# Altium footprint library Fuse.PcbLib: 15 footprints
Each footprint in its own frame and in the unit in brackets; x right, y up, seen from the top. Pads: shape width x height; smd on the part's side, far side on the other; paste and mask are expansions set on the pad; w line width, h text height; cw(c..) or ccw(c..) is an arc to the next point about the centre after c.
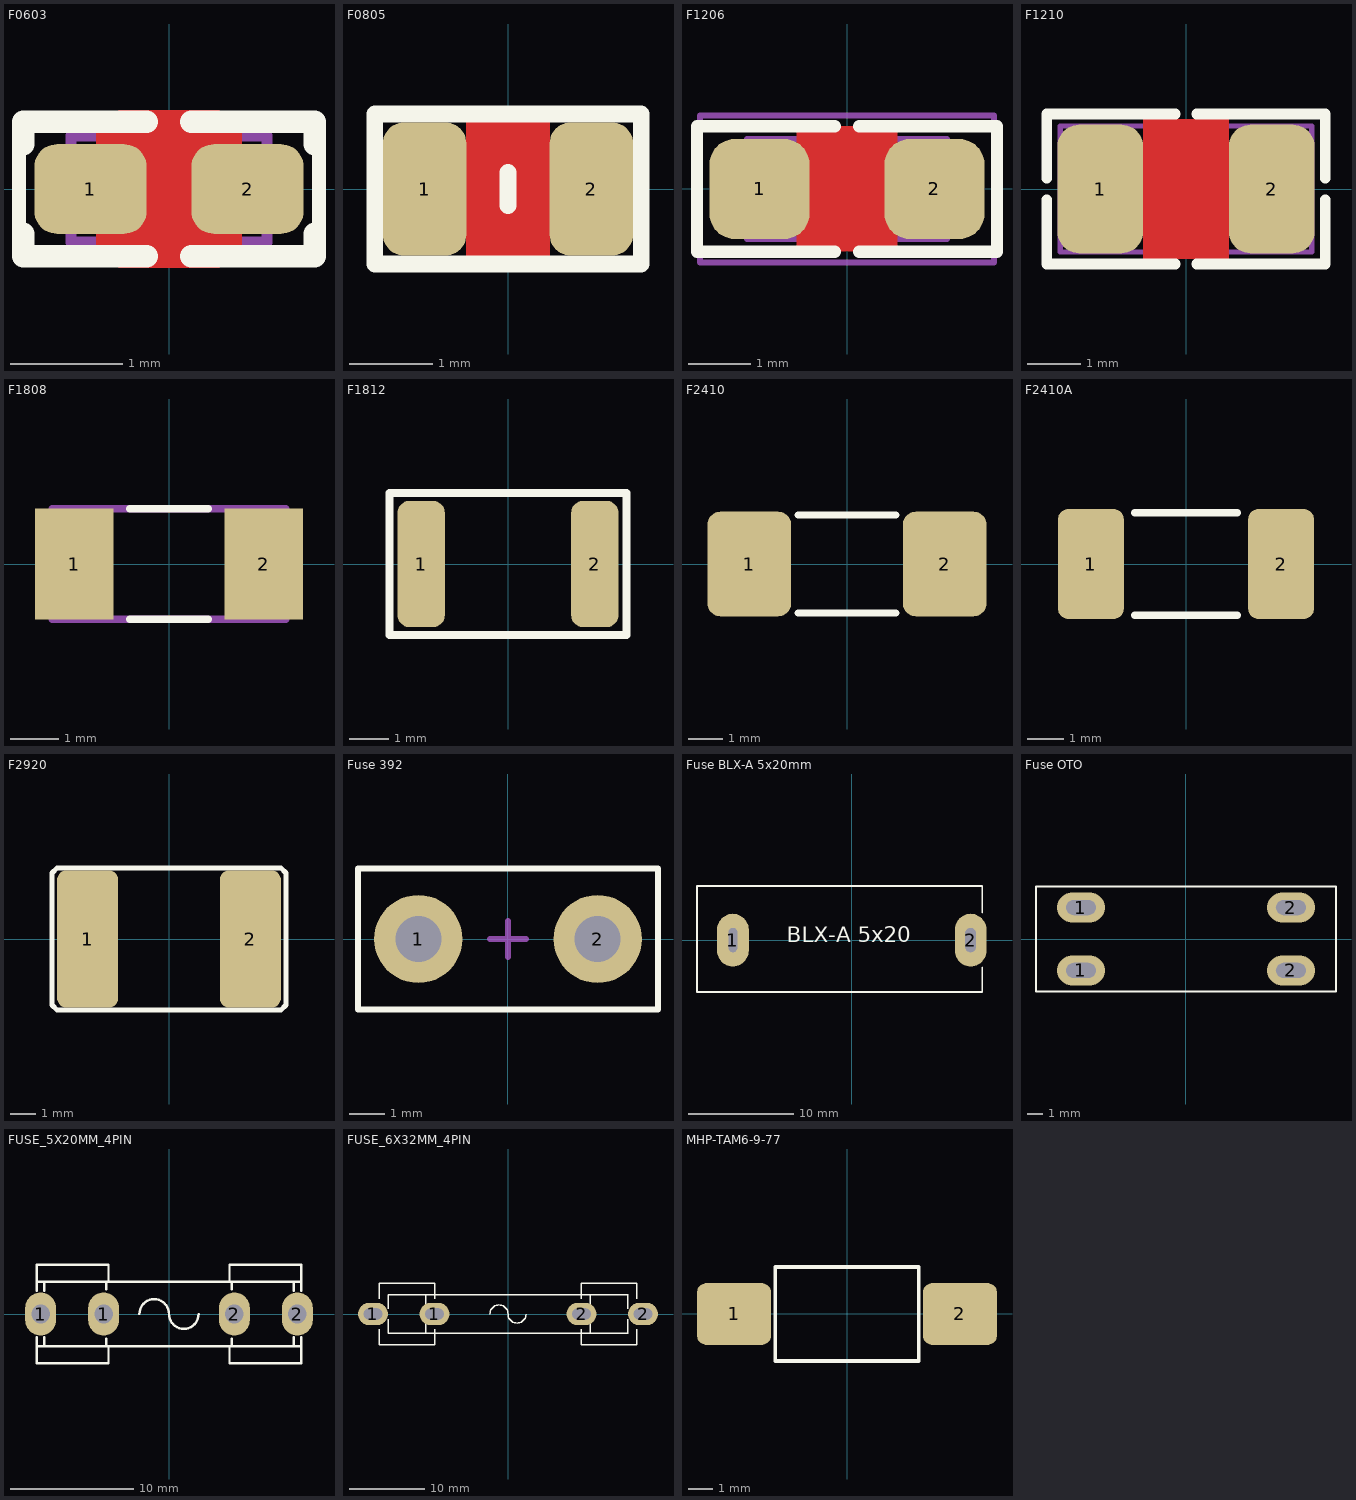
[diagram p0: the footprints below, top view; thin cyan lines are the x and y axes]

## F0603 [mm] "FUSE FAST 500mA, 1.6x0.8mm, 0603"
height 0.8
pads (2):
  rrect50% 1x0.8 smd paste-2 mask+0.075: 1(-0.7,0) 2(0.7,0)
Top Layer:
  pour cut-out: -0.65,0.5 -0.45,0.7 0.45,0.7 0.65,0.5 0.65,-0.5 0.45,-0.7 -0.45,-0.7 -0.65,-0.5
Top Overlay:
  lines w0.125: -1.337,-0.4 -1.337,0.4 ; 1.337,-0.4 1.337,0.4
  lines w0.2: -1.3,-0.4 -1.3,-0.6 -0.2,-0.6 ; -1.3,0.4 -1.3,0.6 -0.2,0.6 ; 0.2,-0.6 1.3,-0.6 1.3,-0.4 ; 0.2,0.6 1.3,0.6 1.3,0.4
Top Paste:
  region: 0.7,0.35 0.63,0.35 0.502,0.297 0.403,0.198 0.35,0.07 0.35,0 0.35,-0.07 0.403,-0.198 0.502,-0.297 0.63,-0.35 0.7,-0.35 0.9,-0.35 0.93,-0.35 0.985,-0.327 1.027,-0.285 1.05,-0.23 1.05,-0.2 1.05,0.2 1.05,0.23 1.027,0.285 0.985,0.327 0.93,0.35 0.9,0.35
  region: -0.7,0.35 -0.63,0.35 -0.502,0.297 -0.403,0.198 -0.35,0.07 -0.35,0 -0.35,-0.07 -0.403,-0.198 -0.502,-0.297 -0.63,-0.35 -0.7,-0.35 -0.9,-0.35 -0.93,-0.35 -0.985,-0.327 -1.027,-0.285 -1.05,-0.23 -1.05,-0.2 -1.05,0.2 -1.05,0.23 -1.027,0.285 -0.985,0.327 -0.93,0.35 -0.9,0.35
Top Designator:
  text ".Designator" at -3.71,-0.344 h1.52
Mechanical 13:
  lines w0.1: -0.875,-0.475 -0.875,0.475 0.875,0.475 0.875,-0.475 -0.875,-0.475
3D body "MF-FSMF050X-2.stp": height 0.82, standoff 0, extent -0.825,-0.425 0.825,0.425

## F0805 [mm] "FUSE FAST 500mA, 0805, 2012, 2.0X1.3mm"
pads (2):
  rrect50% 1x1.6 smd paste-0.1 mask+0.075: 1(-1,0) 2(1,0)
Top Layer:
  pour cut-out: -0.5,0.8 0.5,0.8 0.5,-0.8 -0.5,-0.8
Top Overlay:
  lines w0.2: 0,-0.2 0,0.2 ; -1.6,-0.9 1.6,-0.9 1.6,0.9 -1.6,0.9 -1.6,-0.9
Top Designator:
  text ".Designator" at -3.71,-0.344 h1.52
3D body "User Library-fuse0805L050WR.step": height 1.24, standoff 0, extent -1.105,-0.749 1.105,0.749

## F1206 [mm] "FUSE, 1206, 3.2x1.6mm"
height 2.5
pads (2):
  rrect50% 1.6x1.6 smd paste-2 mask+0.075: 1(-1.4,0) 2(1.4,0)
Top Layer:
  pour cut-out: -0.8,1 -0.8,-1 0.8,-1 0.8,1
Top Overlay:
  lines w0.2: -2.4,-1 -0.2,-1 ; -2.4,-1 -2.4,1 -0.2,1 ; 0.2,-1 2.4,-1 ; 0.2,1 2.4,1 2.4,-1
Top Paste:
  region: 1.15,0.7 1.1,0.7 1.008,0.662 0.938,0.592 0.9,0.5 0.9,0.45 0.9,-0.45 0.9,-0.5 0.938,-0.592 1.008,-0.662 1.1,-0.7 1.15,-0.7 1.625,-0.7 1.68,-0.7 1.781,-0.658 1.858,-0.581 1.9,-0.48 1.9,-0.425 1.9,0.45 1.9,0.5 1.862,0.592 1.792,0.662 1.7,0.7 1.65,0.7
  region: -1.15,0.7 -1.1,0.7 -1.008,0.662 -0.938,0.592 -0.9,0.5 -0.9,0.45 -0.9,-0.45 -0.9,-0.5 -0.938,-0.592 -1.008,-0.662 -1.1,-0.7 -1.15,-0.7 -1.625,-0.7 -1.68,-0.7 -1.781,-0.658 -1.858,-0.581 -1.9,-0.48 -1.9,-0.425 -1.9,0.45 -1.9,0.5 -1.862,0.592 -1.792,0.662 -1.7,0.7 -1.65,0.7
Top Designator:
  text ".Designator" at -3.71,-0.344 h1.52
Mechanical 13:
  lines w0.1: -1.6,-0.8 1.6,-0.8 1.6,0.8 -1.6,0.8 -1.6,-0.8
Mechanical 15:
  lines w0.1: -0.5,0 0.5,0 ; 0,-0.5 0,0.5 ; -2.35,-1.175 2.35,-1.175 2.35,1.175 -2.35,1.175 -2.35,-1.175
3D body "User Library-FUSER_nanoSMD.step": height 1, standoff 0, extent -1.603,-0.8 1.602,0.8

## F1210 [mm] "FUSE, 1210, 3.2x2.5mm"
height 2.5
pads (2):
  rrect50% 1.6x2.4 smd paste-0.2 mask+0.075: 1(-1.6,0) 2(1.6,0)
Top Layer:
  pour cut-out: -0.8,1.3 -0.8,-1.3 0.8,-1.3 0.8,1.3
Top Overlay:
  lines w0.2: -2.6,-0.2 -2.6,-1.4 -0.2,-1.4 ; -2.6,0.2 -2.6,1.4 -0.2,1.4 ; 0.2,-1.4 2.6,-1.4 2.6,-0.2 ; 0.2,1.4 2.6,1.4 2.6,0.2
Top Designator:
  text ".Designator" at -3.71,-0.344 h1.52
Mechanical 15:
  lines w0.1: -0.5,0 0.5,0 ; 0,-0.5 0,0.5 ; -2.35,-1.175 2.35,-1.175 2.35,1.175 -2.35,1.175 -2.35,-1.175
3D body "ALSRobot-Fuse1210.step": height 0.67, standoff 0, extent -1.607,-1.288 1.607,1.288

## F1808 [mil] "FUSE, 6.1 x 2.69 x 2.69 mm"
height 98.43
pads (2):
  rect 64x90 smd: 1(-77,0) 2(77,0)
Top Overlay:
  lines w6: -32,-45 32,-45 ; -32,45 32,45
Top Designator:
  text ".Designator" at -146.08,-13.54 h60
Mechanical 13:
  lines w6: -55,-45 55,-45 ; -55,-45 -95,-45 -95,45 -55,45 ; -55,-45 -55,45 ; -55,45 55,45 ; 55,-45 95,-45 95,45 55,45 ; 55,-45 55,45
3D body "1808AA101KAT1A--3DModel-STEP-510211.STEP": height 57.01, standoff 0, extent -90.55,-39.37 90.55,39.37

## F1812 [mm] "FUSE, 4.50x3.20mm"
height 2.5
pads (2):
  rrect50% 1.2x3.2 smd paste-0.1 mask+0.1: 1(-2.2,0) 2(2.2,0)
Top Overlay:
  lines w0.2: -3,-1.8 3,-1.8 3,1.8 -3,1.8 -3,-1.8
Top Designator:
  text ".Designator" at -3.71,-0.344 h1.52
3D body "User Library-Fuse 1812.step": height 1.03, standoff 0, extent -2.365,-1.74 2.37,1.74

## F2410 [mm] "FUSE, 6x2.5mm"
height 2.2
pads (2):
  rrect30% 2.4x3 smd paste-0.2 mask+0.1: 1(-2.8,0) 2(2.8,0)
Top Overlay:
  lines w0.2: -1.4,-1.4 1.4,-1.4 ; -1.4,1.4 1.4,1.4
Top Designator:
  text ".Designator" at -3.71,-0.344 h1.52
3D body "User Library-2410 fuse.step": height 2.18, standoff 0.02, extent -3.09,-1.25 3.09,1.25

## F2410A [mm] "FUSE, 6x2.5mm"
height 2.2
pads (2):
  rrect30% 1.8x3 smd paste-0.2 mask+0.1: 1(-2.6,0) 2(2.6,0)
Top Overlay:
  lines w0.2: -1.4,-1.4 1.4,-1.4 ; -1.4,1.4 1.4,1.4
Top Designator:
  text ".Designator" at -3.71,-0.344 h1.52
3D body "User Library-2410 fuse.step": height 2.18, standoff 0.02, extent -3.09,-1.25 3.09,1.25

## F2920 [mm] "FUSE, 7.7x5.3mm"
height 2.5
pads (2):
  rrect30% 2.4x5.4 smd paste-5 mask+0.1: 1(-3.2,0) 2(3.2,0)
Top Overlay:
  lines w0.2: -4.6,-2.6 -4.6,2.6 -4.4,2.8 4.4,2.8 4.6,2.6 4.6,-2.6 4.4,-2.8 -4.4,-2.8 -4.6,-2.6
Top Paste:
  rectangle: -4.2,0.2 -2.2,2.4
  rectangle: -4.2,-2.4 -2.2,-0.2
  region: 4.2,-0.2 2.2,-0.2 2.2,-2.4 4.2,-2.4
  region: 4.2,2.4 2.2,2.4 2.2,0.2 4.2,0.2
Top Designator:
  text ".Designator" at -3.71,-0.344 h1.52
3D body "User Library-FUSE-2920.step": height 1.05, standoff 0.05, extent -3.85,-2.65 3.85,2.65

## Fuse 392 [mm] "Fuse 392"
pads (2):
  round 2.5 hole 1.3: 1(-2.54,0) 2(2.54,0)
Top Overlay:
  lines w0.178: -4.25,-2 4.25,-2 4.25,2 -4.25,2 -4.25,-2
Top Designator:
  text ".Designator" at -3.71,-0.344 h1.52
Mechanical 15:
  lines w0.178: -0.5,0 0.5,0 ; 0,-0.5 0,0.5
3D body "User Library-A3D-008-00001.STEP": height 8, standoff -3, extent -4.25,-2 4.25,2

## Fuse BLX-A 5x20mm [mm]
pads (2):
  oval 3x5 hole 2.286 slot 0.813 at 0 deg: 1(-11.25,0)
  oval 3x5 hole 2.286 slot 1 at 0 deg: 2(11.25,0)
Top Overlay:
  lines w0.178: 12.359,-2.6 12.359,-4.928 -14.654,-4.928 -14.654,5.131 12.359,5.131 12.359,2.6
  text "BLX-A 5x20" at -6.178,-0.705 h2.54
Top Designator:
  text ".Designator" at -4.656,-0.242 h1.52
3D body "Fuse Holder.STEP": height 13.1, standoff -4.7, extent -14.647,-4.898 12.353,5.102

## Fuse OTO [mm]
pads (4):
  oval 3.2x2 hole 1 slot 2 at 0 deg: 1(-7,-2.1) 1(-7,2.1) 2(7,-2.1) 2(7,2.1)
Top Overlay:
  lines w0.15: -10,-3.5 10,-3.5 10,3.5 -10,3.5 -10,-3.5
3D body: height 13.6, standoff 0, extent -10,-3.5 10,3.5

## FUSE_5X20MM_4PIN [mm] "PCB Fuse Holder 5x20mm 4 PIN"
height 6
pads (4):
  oval 2.5x3.5 hole 1.5: 1(-10.4,0) 1(-5.3,0) 2(5.3,0) 2(10.4,0)
Top Overlay:
  lines w0.2: -10.7,-2.6 10.7,-2.6 ; -10.7,-1.9 -10.7,-4 -4.9,-4 -4.9,-2.622 ; -10.7,1.9 -10.7,4 -4.9,4 -4.9,2.622 ; -10.7,2.6 10.7,2.6 ; -10.1,-2.6 -10.1,-1.9 ; -10.1,1.9 -10.1,2.6 ; -5.1,-2.6 -5.1,-2 ; -5.1,2 -5.1,2.6 ; -2.4,0 cw(c-1.2,0) 0,0 ccw(c1.2,0) 2.4,0 ; 4.9,-2.622 4.9,-4 10.7,-4 10.7,-1.9 ; 4.9,2.622 4.9,4 10.7,4 10.7,1.9 ; 5.1,-2.6 5.1,-2 ; 5.1,2 5.1,2.6 ; 10.1,-2.6 10.1,-1.9 ; 10.1,1.9 10.1,2.6
Top Designator:
  text ".Designator" at -3.71,-0.344 h1.52
3D body "User Library-Fusivel-1.step": height 8.59, standoff 3.41, extent -10,-2.5 10,2.7
3D body "User Library-FH-100.step": height 9.99, standoff -3.5, extent -10.8,-3.499 -5.2,3.498
3D body "User Library-FH-100.step": height 9.99, standoff -3.5, extent 5.2,-3.499 10.8,3.498

## FUSE_6X32MM_4PIN [mm] "PCB Fuse Holder 6x32mm 2 PIN, pitch: 15.0mm  24x9mm"
height 10
pads (4):
  oval 4x3 hole 1.5 slot 2.5 at 0 deg: 1(-18,0) 1(-9.8,0) 2(9.8,0) 2(18,0)
Top Overlay:
  lines w0.2: -17.2,-2 -17.2,-4.1 -9.8,-4.1 -9.8,-2 ; -17.2,2 -17.2,4.1 -9.8,4.1 -9.8,2 ; -16,-0.7 -16,-2.6 16,-2.6 16,-0.7 ; -16,0.7 -16,2.6 16,2.6 16,0.7 ; -11,-2.6 -11,-1.4 ; -11,1.4 -11,2.6 ; -2.4,0 cw(c-1.2,0) 0,0 ccw(c1.2,0) 2.4,0 ; 9.8,-2 9.8,-4.1 17.2,-4.1 17.2,-2 ; 9.8,2 9.8,4.1 17.2,4.1 17.2,2 ; 11,-2.6 11,-1.4 ; 11,1.4 11,2.6
Top Designator:
  text ".Designator" at -3.71,-0.344 h1.52
3D body "fuse_Clips LF-102071 with fuse 6_3x32.STEP": height 11.19, standoff -3.3, extent -17.6,-3.95 17.6,3.95
3D body "fuseHolder_OG_Variant 0751_0056.step": height 11, standoff -4, extent -18.9,-3.7 -8.5,3.72

## MHP-TAM6-9-77 [mm] "FUSE, 11x3.8mm"
height 2.5
pads (2):
  rrect30% 3x2.5 smd paste-5 mask+0.1: 1(-4.572,0) 2(4.572,0)
Top Overlay:
  lines w0.15: -2.9,-1.9 2.9,-1.9 2.9,1.9 -2.9,1.9 -2.9,-1.9
Top Designator:
  text ".Designator" at -3.71,-0.344 h1.52
3D body "FUSE_CELL.STEP": height 1.15, standoff 0, extent -5.59,-1.9 5.59,1.9